# Altium footprint library VAOL-S8SB4.PcbLib: 3 footprints
Each footprint in its own frame and in the unit in brackets; x right, y up, seen from the top. Pads: shape width x height; smd on the part's side, far side on the other; paste and mask are expansions set on the pad; w line width, h text height; cw(c..) or ccw(c..) is an arc to the next point about the centre after c.
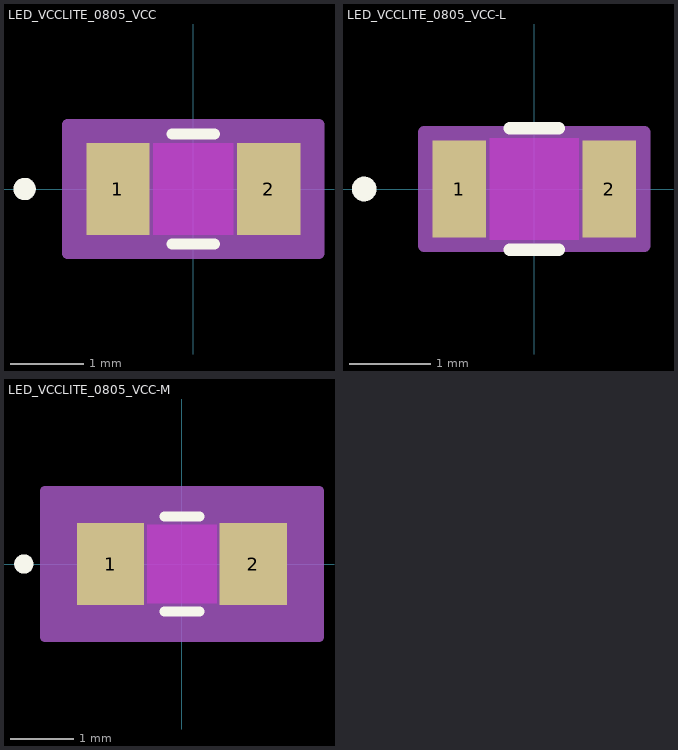
[diagram p0: the footprints below, top view; thin cyan lines are the x and y axes]

## LED_VCCLITE_0805_VCC [mil]
pads (2):
  rect 33.78x49 smd paste+0 mask+0: 1(-40.39,0) 2(40.39,0)
Top Layer keep-out:
  region: -21.5,-22.5 -21.5,22.5 21.5,22.5 21.5,-22.5
Top Overlay:
  circle w6: c-90.28,0 r3
  lines w6: -11.39,-29.5 11.39,-29.5 ; -11.39,29.5 11.39,29.5
  text ".Designator" at -137.5,-25 h50
Keep-Out Layer:
  region: -21.5,-24.5 -21.5,24.5 21.5,24.5 21.5,-24.5
Mechanical 13:
  circle w1: c-35.39,0 r3
  lines w1: -43.5,-24.5 -43.5,24.5 ; -43.5,-24.5 -23.5,-24.5 -23.5,24.5 -43.5,24.5 ; -43.5,-24.5 43.5,-24.5 ; -43.5,-24.5 -43.5,24.5 ; -43.5,24.5 43.5,24.5 ; 43.5,-24.5 23.5,-24.5 23.5,24.5 43.5,24.5 ; 43.5,-24.5 43.5,24.5 ; 43.5,-24.5 43.5,24.5
  text ".Designator" at -137.5,-25 h50
Mechanical 15:
  region: 67.28,-34.5 -67.28,-34.5 -67.28,34.5 67.28,34.5
  lines w6: -67.28,-34.5 -67.28,34.5 67.28,34.5 67.28,-34.5 -67.28,-34.5
3D body "LED_VCCLITE_0805_VCC.step": height 50.98, standoff 0, extent -43.5,-24.49 43.5,24.49

## LED_VCCLITE_0805_VCC-L [mil]
pads (2):
  rect 25.91x47.03 smd paste+0 mask+0: 1(-36.45,0) 2(36.45,0)
Top Layer keep-out:
  region: -21.5,-22.5 -21.5,22.5 21.5,22.5 21.5,-22.5
Top Overlay:
  circle w6: c-82.41,0 r3
  lines w6: -11.85,-29.5 11.85,-29.5 ; -11.85,29.5 11.85,29.5
  text ".Designator" at -137.5,-25 h50
Keep-Out Layer:
  region: -21.5,-24.5 -21.5,24.5 21.5,24.5 21.5,-24.5
Mechanical 13:
  circle w1: c-31.45,0 r3
  lines w1: -43.5,-24.5 -43.5,24.5 ; -43.5,-24.5 -23.5,-24.5 -23.5,24.5 -43.5,24.5 ; -43.5,-24.5 43.5,-24.5 ; -43.5,-24.5 -43.5,24.5 ; -43.5,24.5 43.5,24.5 ; 43.5,-24.5 23.5,-24.5 23.5,24.5 43.5,24.5 ; 43.5,-24.5 43.5,24.5 ; 43.5,-24.5 43.5,24.5
  text ".Designator" at -137.5,-25 h50
Mechanical 15:
  region: 53.41,-27.52 -53.41,-27.52 -53.41,27.52 53.41,27.52
  lines w6: -53.41,-27.52 -53.41,27.52 53.41,27.52 53.41,-27.52 -53.41,-27.52
3D body "LED_VCCLITE_0805_VCC.step": height 50.98, standoff 0, extent -43.5,-24.49 43.5,24.49

## LED_VCCLITE_0805_VCC-M [mil]
pads (2):
  rect 41.65x50.97 smd paste+0 mask+0: 1(-44.33,0) 2(44.33,0)
Top Layer keep-out:
  region: -21.5,-22.5 -21.5,22.5 21.5,22.5 21.5,-22.5
Top Overlay:
  circle w6: c-98.15,0 r3
  lines w6: -11.03,-29.5 11.03,-29.5 ; -11.03,29.5 11.03,29.5
  text ".Designator" at -137.5,-25 h50
Keep-Out Layer:
  region: -21.5,-24.5 -21.5,24.5 21.5,24.5 21.5,-24.5
Mechanical 13:
  circle w1: c-39.33,0 r3
  lines w1: -43.5,-24.5 -43.5,24.5 ; -43.5,-24.5 -23.5,-24.5 -23.5,24.5 -43.5,24.5 ; -43.5,-24.5 43.5,-24.5 ; -43.5,-24.5 -43.5,24.5 ; -43.5,24.5 43.5,24.5 ; 43.5,-24.5 23.5,-24.5 23.5,24.5 43.5,24.5 ; 43.5,-24.5 43.5,24.5 ; 43.5,-24.5 43.5,24.5
  text ".Designator" at -137.5,-25 h50
Mechanical 15:
  region: 85.15,-45.48 -85.15,-45.48 -85.15,45.48 85.15,45.48
  lines w6: -85.15,-45.48 -85.15,45.48 85.15,45.48 85.15,-45.48 -85.15,-45.48
3D body "LED_VCCLITE_0805_VCC.step": height 50.98, standoff 0, extent -43.5,-24.49 43.5,24.49